# Altium footprint library PcbLib1.PcbLib: 1 footprints
Each footprint in its own frame and in the unit in brackets; x right, y up, seen from the top. Pads: shape width x height; smd on the part's side, far side on the other; paste and mask are expansions set on the pad; w line width, h text height; cw(c..) or ccw(c..) is an arc to the next point about the centre after c.
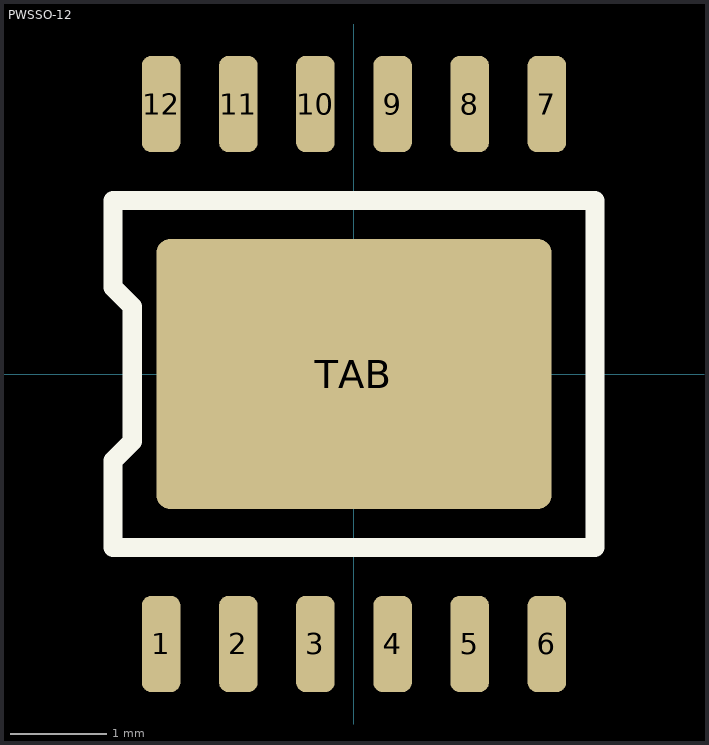
[diagram p0: the footprint, top view; thin cyan lines are the x and y axes]

## PWSSO-12 [mm] "L99VR035PTR"
pads (13):
  rrect50% 0.4x1 smd: 1(-2,-2.8) 2(-1.2,-2.8) 3(-0.4,-2.8) 4(0.4,-2.8) 5(1.2,-2.8) 6(2,-2.8) 7(2,2.8) 8(1.2,2.8) 9(0.4,2.8) 10(-0.4,2.8) 11(-1.2,2.8) 12(-2,2.8)
  rrect10% 4.1x2.8 smd: TAB(0,0)
Top Overlay:
  lines w0.2: -2.5,-1.8 -2.5,-0.9 -2.3,-0.7 -2.3,0.7 -2.5,0.9 -2.5,1.8 2.5,1.8 2.5,-1.8 -2.5,-1.8
3D body "PSSO-12.STEP": height 1.63, standoff 0, extent -2.5,-3.1 2.5,3.1